# Altium footprint library Footprint_Vlad.PcbLib: 392 footprints (part 6 of 25)
Each footprint in its own frame and in the unit in brackets; x right, y up, seen from the top. Pads: shape width x height; smd on the part's side, far side on the other; paste and mask are expansions set on the pad; w line width, h text height; cw(c..) or ccw(c..) is an arc to the next point about the centre after c.
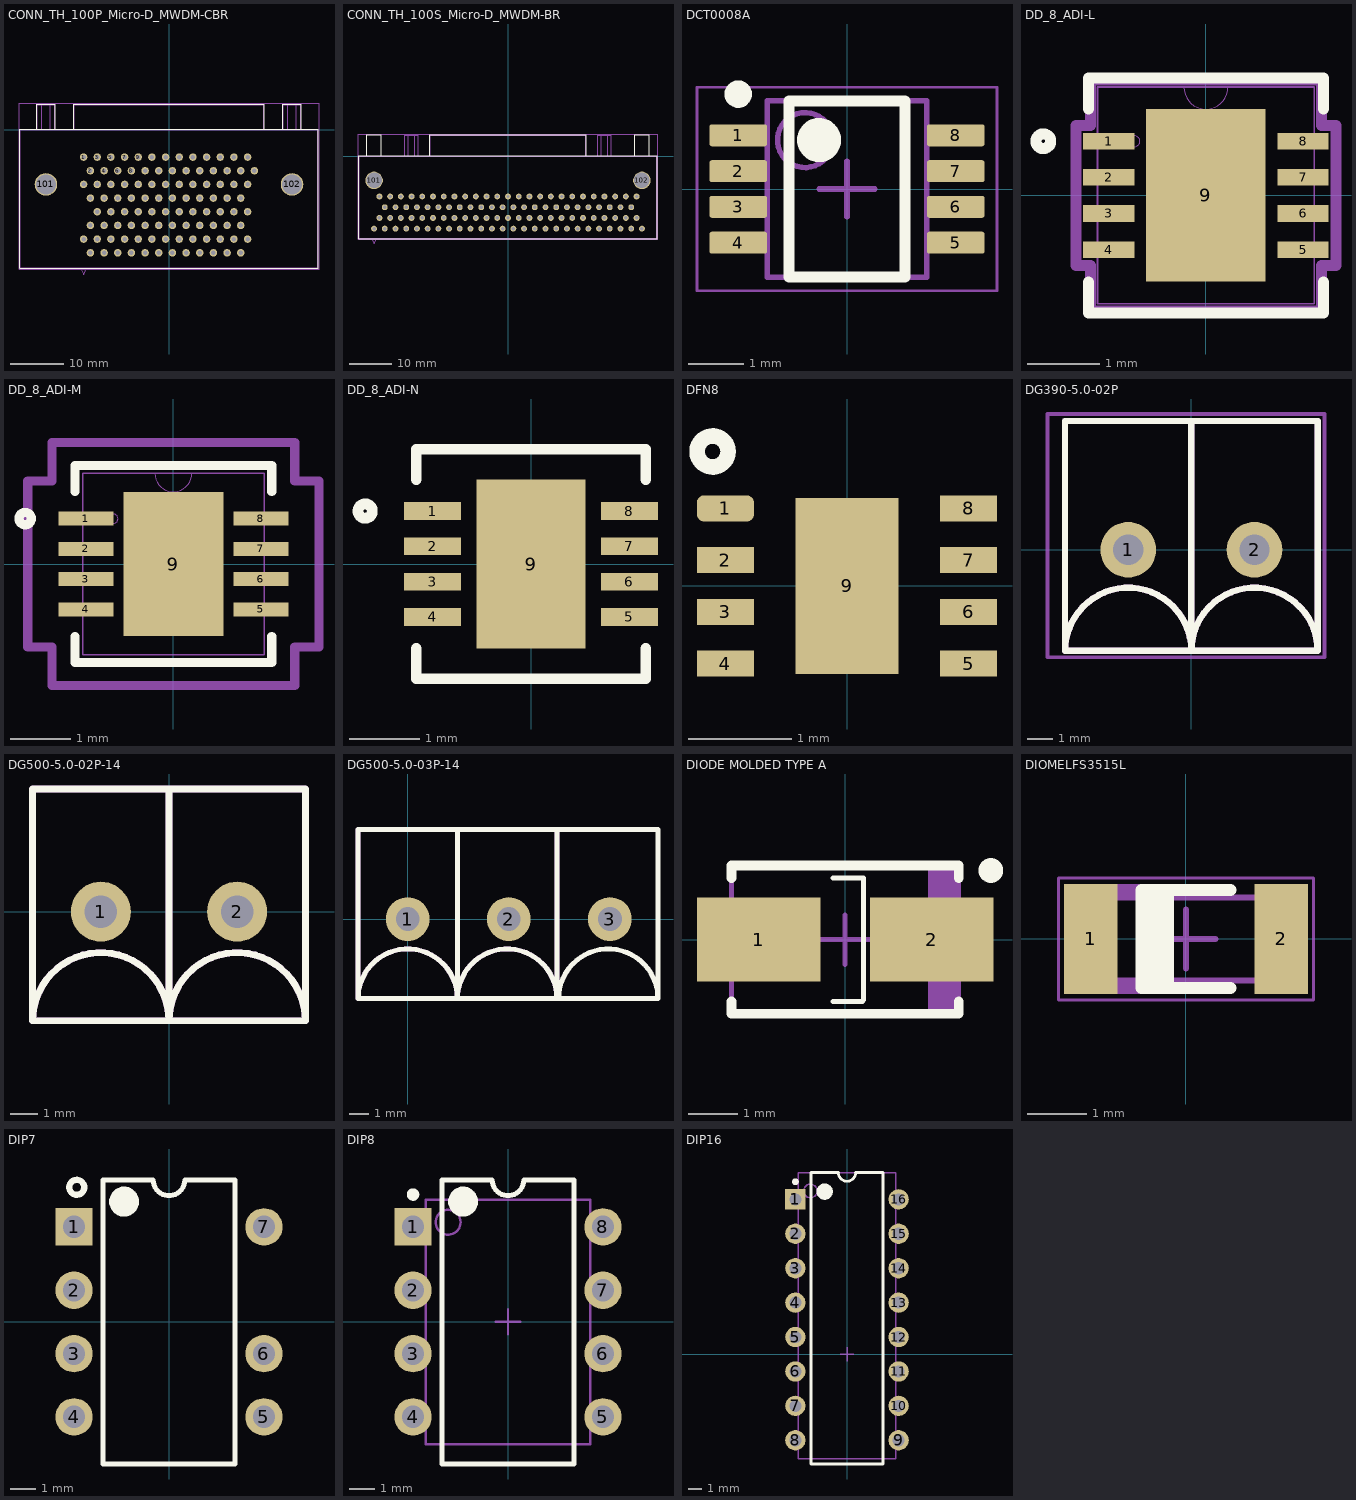
[diagram p5: the footprints below, top view; thin cyan lines are the x and y axes]

## CONN_TH_100P_Micro-D_MWDM-CBR [mil] "100 pin Glenair Micro-D MWDM-CBR Right Angle Thru-Hole"
height 394.09
pads (102):
  round 55 hole 32.01 mask+0: 1(-625,-200) 2(-575,-300) 3(-525,-200) 4(-475,-300) 5(-425,-200) 6(-375,-300) 7(-325,-200) 8(-275,-300) 9(-225,-200) 10(-175,-300) 11(-125,-200) 12(-75,-300) 13(-25,-200) 14(25,-300) 15(75,-200) 16(125,-300) 17(175,-200) 18(225,-300) 19(275,-200) 20(325,-300) 21(375,-200) 22(425,-300) 23(475,-200) 24(525,-300) 25(575,-200) 26(625,-300) 27(-625,-400) 28(-575,-500) 29(-525,-400) 30(-475,-500) 31(-425,-400) 32(-375,-500) 33(-325,-400) 34(-275,-500) 35(-225,-400) 36(-175,-500) 37(-125,-400) 38(-75,-500) 39(-25,-400) 40(25,-500) 41(75,-400) 42(125,-500) 43(175,-400) 44(225,-500) 45(275,-400) 46(325,-500) 47(375,-400) 48(425,-500) 49(475,-400) 50(525,-500) 51(575,-400) 52(-575,-700) 53(-525,-600) 54(-475,-700) 55(-425,-600) 56(-375,-700) 57(-325,-600) 58(-275,-700) 59(-225,-600) 60(-175,-700) 61(-125,-600) 62(-75,-700) 63(-25,-600) 64(25,-700) 65(75,-600) 66(125,-700) 67(175,-600) 68(225,-700) 69(275,-600) 70(325,-700) 71(375,-600) 72(425,-700) 73(475,-600) 74(525,-700) 75(575,-600) 76(-625,-800) 77(-575,-900) 78(-525,-800) 79(-475,-900) 80(-425,-800) 81(-375,-900) 82(-325,-800) 83(-275,-900) 84(-225,-800) 85(-175,-900) 86(-125,-800) 87(-75,-900) 88(-25,-800) 89(25,-900) 90(75,-800) 91(125,-900) 92(175,-800) 93(225,-900) 94(275,-800) 95(325,-900) 96(375,-800) 97(425,-900) 98(475,-800) 99(525,-900) 100(575,-800)
  round 164.57 hole 144.88 unplated: 101(-900,-400) 102(900,-400)
Top Overlay:
  lines w6: -967.5,7.87 -967.5,188 -832.5,188 -832.5,5 ; -696.5,7.87 -696.5,188 696.5,188 696.5,7.87 ; 832.5,5 832.5,188 967.5,188 967.5,5 ; -1092.5,-1015 -1092.5,5 1092.5,5 1092.5,-1015 -1092.5,-1015
Mechanical 13:
  lines w1: -962.5,0 -962.5,183 -837.5,183 -837.5,0 ; -931.25,0 -931.25,183 ; -868.75,0 -868.75,183 ; -650,-1010 -625,-1060 -600,-1010 ; 837.5,0 837.5,183 962.5,183 962.5,0 ; 868.75,0 868.75,183 ; 931.25,0 931.25,183 ; -1087.5,-1010 -1087.5,0 1087.5,0 1087.5,-1010 -1087.5,-1010 ; -691.5,0 -691.5,183 691.5,183 691.5,0 -691.5,0
Mechanical 15:
  lines w6: -1097.5,-1020 1097.5,-1020 1097.5,193 -1097.5,193 -1097.5,-1020
3D body "mwdmxl-100pcbr.stp": height 393.7, standoff -100.39, extent -1085.04,-1000 1085.04,186.22

## CONN_TH_100S_Micro-D_MWDM-BR [mil] "100 pin Glenair Micro-D MWDM-BR Right Angle Thru-Hole"
height 394.09
pads (102):
  round 55 hole 32 mask+0: 1(-1250,-675) 2(-1150,-675) 3(-1050,-675) 4(-950,-675) 5(-850,-675) 6(-750,-675) 7(-650,-675) 8(-550,-675) 9(-450,-675) 10(-350,-675) 11(-250,-675) 12(-150,-675) 13(-50,-675) 14(50,-675) 15(150,-675) 16(250,-675) 17(350,-675) 18(450,-675) 19(550,-675) 20(650,-675) 21(750,-675) 22(850,-675) 23(950,-675) 24(1050,-675) 25(1150,-675) 26(1250,-675) 27(-1200,-575) 28(-1100,-575) 29(-1000,-575) 30(-900,-575) 31(-800,-575) 32(-700,-575) 33(-600,-575) 34(-500,-575) 35(-400,-575) 36(-300,-575) 37(-200,-575) 38(-100,-575) 39(0,-575) 40(100,-575) 41(200,-575) 42(300,-575) 43(400,-575) 44(500,-575) 45(600,-575) 46(700,-575) 47(800,-575) 48(900,-575) 49(1000,-575) 50(1100,-575) 51(1200,-575) 52(-1150,-475) 53(-1050,-475) 54(-950,-475) 55(-850,-475) 56(-750,-475) 57(-650,-475) 58(-550,-475) 59(-450,-475) 60(-350,-475) 61(-250,-475) 62(-150,-475) 63(-50,-475) 64(50,-475) 65(150,-475) 66(250,-475) 67(350,-475) 68(450,-475) 69(550,-475) 70(650,-475) 71(750,-475) 72(850,-475) 73(950,-475) 74(1050,-475) 75(1150,-475) 76(-1200,-375) 77(-1100,-375) 78(-1000,-375) 79(-900,-375) 80(-800,-375) 81(-700,-375) 82(-600,-375) 83(-500,-375) 84(-400,-375) 85(-300,-375) 86(-200,-375) 87(-100,-375) 88(0,-375) 89(100,-375) 90(200,-375) 91(300,-375) 92(400,-375) 93(500,-375) 94(600,-375) 95(700,-375) 96(800,-375) 97(900,-375) 98(1000,-375) 99(1100,-375) 100(1200,-375)
  round 164.57 hole 144.88 unplated: 101(-1250,-225) 102(1250,-225)
Top Overlay:
  lines w6: -1317.5,7.87 -1317.5,200 -1182.5,200 -1182.5,5 ; -730.5,7.87 -730.5,200 730.5,200 730.5,7.87 ; 1182.5,5 1182.5,200 1317.5,200 1317.5,5 ; -1395,-770 -1395,5 1395,5 1395,-770 -1395,-770
Mechanical 13:
  lines w1: -1275,-765 -1250,-815 -1225,-765 ; -962.5,0 -962.5,195 -837.5,195 -837.5,0 ; -931.25,0 -931.25,195 ; -868.75,0 -868.75,195 ; 837.5,0 837.5,195 962.5,195 962.5,0 ; 868.75,0 868.75,195 ; 931.25,0 931.25,195 ; -1390,-765 -1390,0 1390,0 1390,-765 -1390,-765 ; -725.5,0 -725.5,195 725.5,195 725.5,0 -725.5,0
Mechanical 15:
  lines w6: -1400,-775 1400,-775 1400,205 -1400,205 -1400,-775
3D body "mwdmxl-100sbr v2.step": height 397.64, standoff -96.06, extent -1389.76,-761.81 1389.77,198.04

## CR2032 [mm]

## DCT0008A [mm] "SOP, 8-Leads, Body 2.9x3.2mm, Pitch 0.65mm, IPC Medium Density"
height 1.3
pads (8):
  rrect25% 1.05x0.4 smd: 1(-1.975,0.975) 2(-1.975,0.325) 3(-1.975,-0.325) 4(-1.975,-0.975) 5(1.975,-0.975) 6(1.975,-0.325) 7(1.975,0.325) 8(1.975,0.975)
Top Overlay:
  circle w0.25: c-1.975,1.725 r0.125
  circle w0.4: c-0.508,0.889 r0.2
  lines w0.2: -1.05,-1.6 -1.05,1.6 1.05,1.6 1.05,-1.6 -1.05,-1.6
Mechanical 1:
  text ".Designator" at -1.143,-0.381 h0.6
Mechanical 13:
  circle w0.1: c-0.762,0.889 r0.5
  lines w0.1: -1.45,-1.6 -1.45,1.6 1.45,1.6 1.45,-1.6 -1.45,-1.6
Mechanical 15:
  lines w0.05: -2.725,-1.85 -2.725,1.85 2.725,1.85 2.725,-1.85 -2.725,-1.85
  lines w0.1: -0.5,0 0.5,0 ; 0,-0.5 0,0.5
3D body "DCT0008A.stp": height 1.3, standoff 0, extent -2.011,-1.475 2.011,1.475

## DD_8_ADI-L [mm]
pads (9):
  rect 0.708x0.229 smd paste+0 mask+0: 1(-1.345,0.75) 2(-1.345,0.25) 3(-1.345,-0.25) 4(-1.345,-0.75) 5(1.345,-0.75) 6(1.345,-0.25) 7(1.345,0.25) 8(1.345,0.75)
  rect 1.651x2.388 smd paste+0 mask+0: 9(0,0)
Top Overlay:
  circle w0.152: c-2.249,0.75 r0.102
  lines w0.152: -1.626,-1.197 -1.626,-1.626 1.626,-1.626 1.626,-1.197 ; -1.626,1.197 -1.626,1.626 1.626,1.626 1.626,1.197
Mechanical 13:
  circle w0: c-0.991,0.75 r0.076
  lines w0: -0.305,1.499 ccw(c0,1.499) 0.305,1.499
  lines w0.025: -1.499,-1.499 1.499,-1.499 1.499,1.499 -1.499,1.499 -1.499,-1.499
Mechanical 15:
  lines w0.152: -1.8,-0.966 -1.8,0.966 -1.6,0.966 -1.6,1.6 1.6,1.6 1.6,0.966 1.8,0.966 1.8,-0.966 1.6,-0.966 1.6,-1.6 -1.6,-1.6 -1.6,-0.966 -1.8,-0.966
3D body: height 0.25, standoff 0, extent 0,0 0.254,0.254
3D body "DD_8_ADI.step": height 0.81, standoff 0, extent -1.499,-1.499 1.499,1.499

## DD_8_ADI-M [mm]
pads (9):
  rect 0.908x0.229 smd paste+0 mask+0: 1(-1.445,0.75) 2(-1.445,0.25) 3(-1.445,-0.25) 4(-1.445,-0.75) 5(1.445,-0.75) 6(1.445,-0.25) 7(1.445,0.25) 8(1.445,0.75)
  rect 1.651x2.388 smd paste+0 mask+0: 9(0,0)
Top Overlay:
  circle w0.152: c-2.449,0.75 r0.102
  lines w0.152: -1.626,-1.197 -1.626,-1.626 1.626,-1.626 1.626,-1.197 ; -1.626,1.197 -1.626,1.626 1.626,1.626 1.626,1.197
Mechanical 13:
  circle w0: c-0.991,0.75 r0.076
  lines w0: -0.305,1.499 ccw(c0,1.499) 0.305,1.499
  lines w0.025: -1.499,-1.499 -1.499,1.499 1.499,1.499 1.499,-1.499 -1.499,-1.499
Mechanical 15:
  lines w0.152: -2.407,-1.373 -2.007,-1.373 -2.007,-2.007 2.007,-2.007 2.007,-1.373 2.407,-1.373 2.407,1.373 2.007,1.373 2.007,2.007 -2.007,2.007 -2.007,1.373 -2.407,1.373 -2.407,-1.373
3D body: height 0.25, standoff 0, extent 0,0 0.254,0.254
3D body "DD_8_ADI.step": height 0.81, standoff 0, extent -1.499,-1.499 1.499,1.499

## DD_8_ADI-N [mm]
pads (9):
  rect 0.808x0.25 smd paste+0 mask+0: 1(-1.395,0.75) 2(-1.395,0.25) 3(-1.395,-0.25) 4(-1.395,-0.75) 5(1.395,-0.75) 6(1.395,-0.25) 7(1.395,0.25) 8(1.395,0.75)
  rect 1.55x2.388 smd paste+0 mask+0: 9(0,0)
Top Overlay:
  circle w0.152: c-2.349,0.75 r0.102
  lines w0.152: -1.626,-1.197 -1.626,-1.626 1.626,-1.626 1.626,-1.197 ; -1.626,1.197 -1.626,1.626 1.626,1.626 1.626,1.197
3D body: height 0.25, standoff 0, extent 0,0 0.254,0.254
3D body "DD_8_ADI.step": height 0.81, standoff 0, extent -1.499,-1.499 1.499,1.499

## DFN8 [mm]
pads (9):
  rrect50% 0.55x0.25 smd: 1(-1.175,0.75)
  rect 0.55x0.25 smd: 2(-1.175,0.25) 3(-1.175,-0.25) 4(-1.175,-0.75) 5(1.175,-0.75) 6(1.175,-0.25) 7(1.175,0.25) 8(1.175,0.75)
  rect 1x1.7 smd: 9(0,0)
Top Overlay:
  circle w0.15: c-1.3,1.3 r0.15
3D body "User Library-sht3x-1.step": height 0.9, standoff 0, extent -1.254,-1.226 1.246,1.274

## DG390-5.0-02P [mm] "2-pin Wire Terminal 13.5A 250V Rated"
pads (2):
  round 2.2 hole 1.2: 1(-2.5,0) 2(2.5,0)
Top Overlay:
  lines w0.25: 0,5.1 0,-4 ; -5,-4 cw(c-2.5,-4) 0,-4 ; -5,-4 -5,5.1 ; -5,-4 0,-4 ; -5,5.1 5,5.1 5,-4 ; -5,5.1 -5,5.1 ; 0,-4 cw(c2.5,-4) 5,-4 ; 0,-4 5,-4
Assembly Top:
  lines w0.25: 0,5.1 0,-4 ; -5,-4 cw(c-2.5,-4) 0,-4 ; -5,-4 0,-4 ; -5,-4 -5,5.1 5,5.1 5,-4 ; 0,-4 cw(c2.5,-4) 5,-4 ; 0,-4 5,-4
Courtyard Top:
  lines w0.15: -5.7,-4.25 5.275,-4.25 5.275,5.375 -5.7,5.375 -5.7,-4.25
3D body "DG390-5.0-02P-00A.stp": height 15.05, standoff -4.75, extent -5.6,-5.55 5,5.1

## DG500-5.0-02P-14 [mm]
pads (2):
  round 2.2 hole 1.2: 1(-2.5,0) 2(2.5,0)
Top Overlay:
  lines w0.25: -5,-4 cw(c-2.5,-4) 0,-4 ; -5,-4 0,-4 ; -5,-4 -5,4.5 0,4.5 ; 0,-4 cw(c2.5,-4) 5,-4 ; 0,-4 5,-4 ; 0,-4 0,4.5 ; 0,4.5 5,4.5 5,-4
Mechanical 1:
  lines w0.25: -5,-4 cw(c-2.5,-4) 0,-4 ; -5,-4 -5,4.5 0,4.5 ; -5,-4 0,-4 ; 0,-4 cw(c2.5,-4) 5,-4 ; 0,-4 5,-4 ; 0,-4 0,4.5 ; 0,4.5 5,4.5 5,-4
3D body "pxc_1715022_03_MKDS-1-5-2_3D.stp": height 13.8, standoff -3.5, extent -5.77,-4.6 4.97,5.2

## DG500-5.0-03P-14 [mm]
pads (3):
  round 2.2 hole 1.2: 1(0,0) 2(5.08,0) 3(10.16,0)
Top Overlay:
  lines w0.25: 7.58,4.5 12.58,4.5 12.58,-4 ; -2.5,-4 cw(c0,-4) 2.5,-4 ; -2.5,-4 2.5,-4 ; -2.5,-4 -2.5,4.5 2.5,4.5 ; 2.5,-4 cw(c5,-4) 7.5,-4 ; 2.5,-4 7.5,-4 ; 2.5,-4 2.5,4.5 ; 2.5,4.5 7.5,4.5 7.5,-4 ; 12.58,-4 ccw(c10.08,-4) 7.58,-4 12.58,-4
Mechanical 1:
  lines w0.25: -2.5,-4 cw(c0,-4) 2.5,-4 ; -2.5,-4 -2.5,4.5 2.5,4.5 ; -2.5,-4 2.5,-4 ; 2.5,-4 cw(c5,-4) 7.5,-4 ; 2.5,-4 7.5,-4 ; 2.5,-4 2.5,4.5 ; 2.5,4.5 7.5,4.5 7.5,-4

## DIODE MOLDED TYPE A [mm] "Molded Diode, 2-Leads, Body 4.30x2.60mm, IPC Medium Density"
height 2.3
pads (2):
  rect 2.5x1.7 smd: 1(-1.75,0) 2(1.75,0)
Top Overlay:
  circle w0.25: c2.95,1.4 r0.125
  lines w0.1: -0.25,-1.25 0.35,-1.25 ; -0.25,1.25 0.375,1.25 0.375,-1.225
  lines w0.2: -2.3,-1.25 -2.3,-1.5 2.3,-1.5 2.3,-1.25 ; -2.3,1.25 -2.3,1.5 2.3,1.5 2.3,1.25
Mechanical 15:
  rectangle: 1.681,-1.46 2.3,1.46
  lines w0.1: -0.5,0 0.5,0 ; 0,-0.5 0,0.5 ; -2.3,-1.46 -2.3,1.46 2.3,1.46 2.3,-1.46 -2.3,-1.46
  text ".Designator" at -2.7,1.9 h1.52
3D body "DIODE MOLDED TYPE A.step": height 2.3, standoff 0, extent -2.52,-1.46 2.52,1.46

## DIOMELFS3515L [mm] "MELF S Diode, 2-Leads, Body 3,50x1,50mm, IPC High Density"
height 1.4
pads (2):
  rect 0.9x1.85 smd: 1(-1.6,0) 2(1.6,0)
Top Overlay:
  rectangle: -0.75,-0.825 -0.2,0.825
  lines w0.2: 0.75,-0.825 -0.75,-0.825 -0.75,0.825 0.75,0.825
Mechanical 13:
  lines w0.1: -1.85,-0.7 1.85,-0.7 1.85,0.7 -1.85,0.7 -1.85,-0.7
Mechanical 15:
  rectangle: -1.75,-0.825 -1.2,0.825
  lines w0.05: -2.15,-1.025 2.15,-1.025 2.15,1.025 -2.15,1.025 -2.15,-1.025
  lines w0.1: -0.5,0 0.5,0 ; 0,-0.5 0,0.5
  lines w0.2: -0.25,-0.825 -1.75,-0.825 -1.75,0.825 -0.25,0.825
  text ".Designator" at -2.2,1.3 h1.52
3D body: height 1.39, standoff 0, extent 1.38,-0.7 1.85,0.697
3D body: height 1.38, standoff 0.04, extent -1.38,-0.67 1.38,0.667
3D body: height 1.38, standoff 0.04, extent -0.78,-0.671 -0.18,0.668
3D body: height 1.39, standoff 0, extent -1.85,-0.7 -1.38,0.697

## DIP7 [mm] "DIP, 7-Leads, Row Spacing 7.62mm, Pitch 2.54mm, Body 9.65x6.3mm"
height 4.5
pads (7):
  rect 1.5x1.5 hole 0.9: 1(-3.81,3.81)
  round 1.5 hole 0.9: 2(-3.81,1.27) 3(-3.81,-1.27) 4(-3.81,-3.81) 5(3.81,-3.81) 6(3.81,-1.27) 7(3.81,3.81)
Top Overlay:
  circle w0.25: c-3.7,5.4 r0.3
  circle w0.6: c-1.8,4.825 r0.3
  lines w0.15: -2.65,5.7 -2.65,5.7
  lines w0.2: -2.65,4.9 -2.65,-5.7 2.65,-5.7 2.65,5.7 1.435,5.7 0.635,5.7 cw(c0,5.7) -0.635,5.7 ; -2.65,4.925 -2.65,5.7 -0.634,5.7
3D body "CircuitWorks-DIP8.step": height 4.19, standoff -2.67, extent -3.937,-5.715 3.937,5.715

## DIP8 [mm] "DIP, 8-Leads, Row Spacing 7.62mm, Pitch 2.54mm, Body 9.65x6.3mm"
height 4.5
pads (8):
  rect 1.5x1.5 hole 0.9: 1(-3.81,3.81)
  round 1.5 hole 0.9: 2(-3.81,1.27) 3(-3.81,-1.27) 4(-3.81,-3.81) 5(3.81,-3.81) 6(3.81,-1.27) 7(3.81,1.27) 8(3.81,3.81)
Top Overlay:
  circle w0.25: c-3.81,5.11 r0.125
  circle w0.6: c-1.8,4.825 r0.3
  lines w0.15: -2.65,5.7 -2.65,5.7
  lines w0.2: -2.65,4.9 -2.65,-5.7 2.65,-5.7 2.65,5.7 1.435,5.7 0.635,5.7 cw(c0,5.7) -0.635,5.7 ; -2.65,4.925 -2.65,5.7 -0.634,5.7
Mechanical 13:
  circle w0.1: c-2.4,4 r0.5
  lines w0.1: -3.3,-4.9 -3.3,4.9 3.3,4.9 3.3,-4.9 -3.3,-4.9
Mechanical 15:
  lines w0.1: -0.5,0 0.5,0 ; 0,-0.5 0,0.5
3D body "CircuitWorks-DIP8.step": height 4.19, standoff -2.67, extent -3.937,-5.715 3.937,5.715

## DIP16 [mm] "DIP, 16-Pin, Row Spacing 7.62 mm, Pitch 2.54 mm"
height 4.57
pads (16):
  rect 1.5x1.5 hole 0.9: 1(-3.81,11.43)
  round 1.5 hole 0.9: 2(-3.81,8.89) 3(-3.81,6.35) 4(-3.81,3.81) 5(-3.81,1.27) 6(-3.81,-1.27) 7(-3.81,-3.81) 8(-3.81,-6.35) 9(3.81,-6.35) 10(3.81,-3.81) 11(3.81,-1.27) 12(3.81,1.27) 13(3.81,3.81) 14(3.81,6.35) 15(3.81,8.89) 16(3.81,11.43)
Top Overlay:
  circle w0.6: c-1.65,12 r0.3
  circle w0.25: c-3.81,12.73 r0.125
  lines w0.2: -2.65,-8.1 2.65,-8.1 2.65,13.405 0.635,13.405 cw(c0,13.405) -0.635,13.405 -2.65,13.405 -2.65,-8.1
Mechanical 13:
  circle w0.1: c-2.7,12.05 r0.5
  lines w0.1: -3.6,-7.7 3.6,-7.7 3.6,13.405 -3.6,13.405 -3.6,-7.7
Mechanical 15:
  lines w0.1: -0.5,0 0.5,0 ; 0,-0.5 0,0.5
3D body "CircuitWorks-DIP16.step": height 4.19, standoff -2.57, extent -3.937,-8.185 3.937,13.405